# Altium footprint library 4.50-FPC插座-0.5mm间距.PcbLib: 41 footprints (part 3 of 3)
Each footprint in its own frame and in the unit in brackets; x right, y up, seen from the top. Pads: shape width x height; smd on the part's side, far side on the other; paste and mask are expansions set on the pad; w line width, h text height; cw(c..) or ccw(c..) is an arc to the next point about the centre after c.
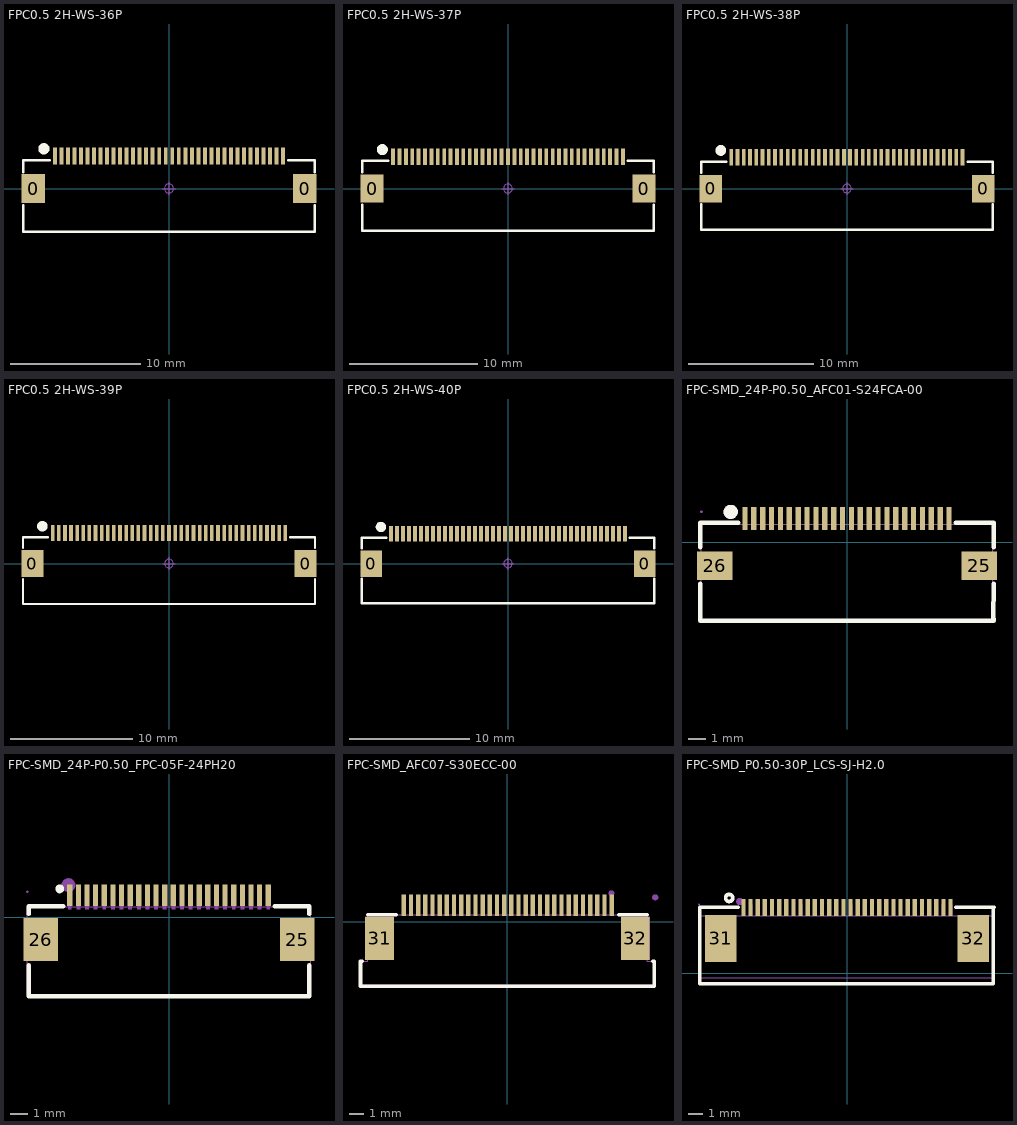
[diagram p2: the footprints below, top view; thin cyan lines are the x and y axes]

## FPC0.5 2H-WS-36P [mm] "长：22.2mm，宽：5.2mm，高：2mm 淘宝ID:黄晶宝石   店铺网址:https://shop463601444.taobao.com"
pads (38):
  rect 1.8x2.2 smd: 0(-10.4,0) 0(10.4,0)
  rect 0.3x1.3 smd: 1(-8.75,2.497) 2(-8.25,2.497) 3(-7.75,2.497) 4(-7.25,2.497) 5(-6.75,2.497) 6(-6.25,2.497) 7(-5.75,2.497) 8(-5.25,2.497) 9(-4.75,2.497) 10(-4.25,2.497) 11(-3.75,2.497) 12(-3.25,2.497) 13(-2.75,2.497) 14(-2.25,2.497) 15(-1.75,2.497) 16(-1.25,2.497) 17(-0.75,2.497) 18(-0.25,2.497) 19(0.25,2.497) 20(0.75,2.497) 21(1.25,2.497) 22(1.75,2.497) 23(2.25,2.497) 24(2.75,2.497) 25(3.25,2.497) 26(3.75,2.497) 27(4.25,2.497) 28(4.75,2.497) 29(5.25,2.497) 30(5.75,2.497) 31(6.25,2.497) 32(6.75,2.497) 33(7.25,2.497) 34(7.75,2.497) 35(8.25,2.497) 36(8.75,2.497)
Top Overlay:
  circle w0.5: c-9.594,3.048 r0.18
  lines w0.2: -11.175,-1.27 -11.175,-3.302 11.175,-3.302 11.175,-1.27 ; -11.175,1.27 -11.175,2.159 -9.143,2.159 ; 9.143,2.159 11.175,2.159 11.175,1.27
Mechanical 15:
  circle w0.05: c0,0 r0.35
  lines w0.05: -0.5,0 0.5,0 ; 0,-0.5 0,0.5
3D body "FPC0.5 2H-S-W-36P.STEP": height 2, standoff -0.01, extent -11.1,-3.15 11.1,2.85

## FPC0.5 2H-WS-37P [mm] "长：22.7mm，宽：5.2mm，高：2mm 淘宝ID:黄晶宝石   店铺网址:https://shop463601444.taobao.com"
pads (39):
  rect 1.8x2.2 smd: 0(-10.65,0) 0(10.65,0)
  rect 0.3x1.3 smd: 1(-9,2.497) 2(-8.5,2.497) 3(-8,2.497) 4(-7.5,2.497) 5(-7,2.497) 6(-6.5,2.497) 7(-6,2.497) 8(-5.5,2.497) 9(-5,2.497) 10(-4.5,2.497) 11(-4,2.497) 12(-3.5,2.497) 13(-3,2.497) 14(-2.5,2.497) 15(-2,2.497) 16(-1.5,2.497) 17(-1,2.497) 18(-0.5,2.497) 19(0,2.497) 20(0.5,2.497) 21(1,2.497) 22(1.5,2.497) 23(2,2.497) 24(2.5,2.497) 25(3,2.497) 26(3.5,2.497) 27(4,2.497) 28(4.5,2.497) 29(5,2.497) 30(5.5,2.497) 31(6,2.497) 32(6.5,2.497) 33(7,2.497) 34(7.5,2.497) 35(8,2.497) 36(8.5,2.497) 37(9,2.497)
Top Overlay:
  circle w0.5: c-9.844,3.048 r0.18
  lines w0.2: -11.425,-1.27 -11.425,-3.302 11.425,-3.302 11.425,-1.27 ; -11.425,1.27 -11.425,2.159 -9.393,2.159 ; 9.393,2.159 11.425,2.159 11.425,1.27
Mechanical 15:
  circle w0.05: c0,0 r0.35
  lines w0.05: -0.5,0 0.5,0 ; 0,-0.5 0,0.5
3D body "FPC0.5 2H-S-W-37P.STEP": height 2, standoff -0.01, extent -11.35,-3.15 11.35,2.85

## FPC0.5 2H-WS-38P [mm] "长：23.2mm，宽：5.2mm，高：2mm 淘宝ID:黄晶宝石   店铺网址:https://shop463601444.taobao.com"
pads (40):
  rect 1.8x2.2 smd: 0(-10.9,0) 0(10.9,0)
  rect 0.3x1.3 smd: 1(-9.25,2.497) 2(-8.75,2.497) 3(-8.25,2.497) 4(-7.75,2.497) 5(-7.25,2.497) 6(-6.75,2.497) 7(-6.25,2.497) 8(-5.75,2.497) 9(-5.25,2.497) 10(-4.75,2.497) 11(-4.25,2.497) 12(-3.75,2.497) 13(-3.25,2.497) 14(-2.75,2.497) 15(-2.25,2.497) 16(-1.75,2.497) 17(-1.25,2.497) 18(-0.75,2.497) 19(-0.25,2.497) 20(0.25,2.497) 21(0.75,2.497) 22(1.25,2.497) 23(1.75,2.497) 24(2.25,2.497) 25(2.75,2.497) 26(3.25,2.497) 27(3.75,2.497) 28(4.25,2.497) 29(4.75,2.497) 30(5.25,2.497) 31(5.75,2.497) 32(6.25,2.497) 33(6.75,2.497) 34(7.25,2.497) 35(7.75,2.497) 36(8.25,2.497) 37(8.75,2.497) 38(9.25,2.497)
Top Overlay:
  circle w0.5: c-10.094,3.048 r0.18
  lines w0.2: -11.675,-1.27 -11.675,-3.302 11.675,-3.302 11.675,-1.27 ; -11.675,1.27 -11.675,2.159 -9.643,2.159 ; 9.643,2.159 11.675,2.159 11.675,1.27
Mechanical 15:
  circle w0.05: c0,0 r0.35
  lines w0.05: -0.5,0 0.5,0 ; 0,-0.5 0,0.5
3D body "FPC0.5 2H-S-W-38P.STEP": height 2, standoff -0.01, extent -11.6,-3.15 11.6,2.85

## FPC0.5 2H-WS-39P [mm] "长：23.7mm，宽：5.2mm，高：2mm 淘宝ID:黄晶宝石   店铺网址:https://shop463601444.taobao.com"
pads (41):
  rect 1.8x2.2 smd: 0(-11.15,0) 0(11.15,0)
  rect 0.3x1.3 smd: 1(-9.5,2.497) 2(-9,2.497) 3(-8.5,2.497) 4(-8,2.497) 5(-7.5,2.497) 6(-7,2.497) 7(-6.5,2.497) 8(-6,2.497) 9(-5.5,2.497) 10(-5,2.497) 11(-4.5,2.497) 12(-4,2.497) 13(-3.5,2.497) 14(-3,2.497) 15(-2.5,2.497) 16(-2,2.497) 17(-1.5,2.497) 18(-1,2.497) 19(-0.5,2.497) 20(0,2.497) 21(0.5,2.497) 22(1,2.497) 23(1.5,2.497) 24(2,2.497) 25(2.5,2.497) 26(3,2.497) 27(3.5,2.497) 28(4,2.497) 29(4.5,2.497) 30(5,2.497) 31(5.5,2.497) 32(6,2.497) 33(6.5,2.497) 34(7,2.497) 35(7.5,2.497) 36(8,2.497) 37(8.5,2.497) 38(9,2.497) 39(9.5,2.497)
Top Overlay:
  circle w0.5: c-10.344,3.048 r0.18
  lines w0.2: -11.925,-1.27 -11.925,-3.302 11.925,-3.302 11.925,-1.27 ; -11.925,1.27 -11.925,2.159 -9.893,2.159 ; 9.893,2.159 11.925,2.159 11.925,1.27
Mechanical 15:
  circle w0.05: c0,0 r0.35
  lines w0.05: -0.5,0 0.5,0 ; 0,-0.5 0,0.5
3D body "FPC0.5 2H-S-W-39P.STEP": height 2, standoff -0.01, extent -11.85,-3.15 11.85,2.85

## FPC0.5 2H-WS-40P [mm] "长：24.2mm，宽：5.2mm，高：2mm 淘宝ID:黄晶宝石   店铺网址:https://shop463601444.taobao.com"
pads (42):
  rect 1.8x2.2 smd: 0(-11.4,0) 0(11.4,0)
  rect 0.3x1.3 smd: 1(-9.75,2.497) 2(-9.25,2.497) 3(-8.75,2.497) 4(-8.25,2.497) 5(-7.75,2.497) 6(-7.25,2.497) 7(-6.75,2.497) 8(-6.25,2.497) 9(-5.75,2.497) 10(-5.25,2.497) 11(-4.75,2.497) 12(-4.25,2.497) 13(-3.75,2.497) 14(-3.25,2.497) 15(-2.75,2.497) 16(-2.25,2.497) 17(-1.75,2.497) 18(-1.25,2.497) 19(-0.75,2.497) 20(-0.25,2.497) 21(0.25,2.497) 22(0.75,2.497) 23(1.25,2.497) 24(1.75,2.497) 25(2.25,2.497) 26(2.75,2.497) 27(3.25,2.497) 28(3.75,2.497) 29(4.25,2.497) 30(4.75,2.497) 31(5.25,2.497) 32(5.75,2.497) 33(6.25,2.497) 34(6.75,2.497) 35(7.25,2.497) 36(7.75,2.497) 37(8.25,2.497) 38(8.75,2.497) 39(9.25,2.497) 40(9.75,2.497)
Top Overlay:
  circle w0.5: c-10.594,3.048 r0.18
  lines w0.2: -12.175,-1.27 -12.175,-3.302 12.175,-3.302 12.175,-1.27 ; -12.175,1.27 -12.175,2.159 -10.143,2.159 ; 10.143,2.159 12.175,2.159 12.175,1.27
Mechanical 15:
  circle w0.05: c0,0 r0.35
  lines w0.05: -0.5,0 0.5,0 ; 0,-0.5 0,0.5
3D body "FPC0.5 2H-S-W-40P.STEP": height 2, standoff -0.01, extent -12.1,-3.15 12.1,2.85

## FPC-SMD_24P-P0.50_AFC01-S24FCA-00 [mm]
pads (26):
  rect 0.3x1.3 smd paste+0 mask+0.05: 1(-5.75,1.325) 2(-5.25,1.325) 3(-4.75,1.325) 4(-4.25,1.325) 5(-3.75,1.325) 6(-3.25,1.325) 7(-2.75,1.325) 8(-2.25,1.325) 9(-1.75,1.325) 10(-1.25,1.325) 11(-0.75,1.325) 12(-0.25,1.325) 13(0.25,1.325) 14(0.75,1.325) 15(1.25,1.325) 16(1.75,1.325) 17(2.25,1.325) 18(2.75,1.325) 19(3.25,1.325) 20(3.75,1.325) 21(4.25,1.325) 22(4.75,1.325) 23(5.25,1.325) 24(5.75,1.325)
  rect 2x1.6 smd: 25(7.45,-1.325) 26(-7.45,-1.325)
Top Overlay:
  circle w0.4: c-6.55,1.7 r0.2
  lines w0.254: -8.264,-2.355 -8.264,-4.445 8.256,-4.445 8.256,-4.318 ; -8.263,-0.294 -8.263,1.088 -6.131,1.088 ; 6.131,1.088 8.263,1.088 8.263,-0.294 ; 8.25,-4.35 8.263,-2.356
Mechanical 6:
  circle w0.4: c-6.55,1.7 r0.2
Mechanical 15:
  region: 5.85,0.955 5.65,0.955 5.65,1.705 5.85,1.705
  region: 5.35,0.955 5.15,0.955 5.15,1.705 5.35,1.705
  region: 4.85,0.955 4.65,0.955 4.65,1.705 4.85,1.705
  region: 4.35,0.955 4.15,0.955 4.15,1.705 4.35,1.705
  region: 3.85,0.955 3.65,0.955 3.65,1.705 3.85,1.705
  region: 3.35,0.955 3.15,0.955 3.15,1.705 3.35,1.705
  region: 2.85,0.955 2.65,0.955 2.65,1.705 2.85,1.705
  region: 2.35,0.955 2.15,0.955 2.15,1.705 2.35,1.705
  region: 1.85,0.955 1.65,0.955 1.65,1.705 1.85,1.705
  region: 1.35,0.955 1.15,0.955 1.15,1.705 1.35,1.705
  region: 0.85,0.955 0.65,0.955 0.65,1.705 0.85,1.705
  region: 0.35,0.955 0.15,0.955 0.15,1.705 0.35,1.705
  region: -0.15,0.955 -0.35,0.955 -0.35,1.705 -0.15,1.705
  region: -0.65,0.955 -0.85,0.955 -0.85,1.705 -0.65,1.705
  region: -1.15,0.955 -1.35,0.955 -1.35,1.705 -1.15,1.705
  region: -1.65,0.955 -1.85,0.955 -1.85,1.705 -1.65,1.705
  region: -2.15,0.955 -2.35,0.955 -2.35,1.705 -2.15,1.705
  region: -2.65,0.955 -2.85,0.955 -2.85,1.705 -2.65,1.705
  region: -3.15,0.955 -3.35,0.955 -3.35,1.705 -3.15,1.705
  region: -3.65,0.955 -3.85,0.955 -3.85,1.705 -3.65,1.705
  region: -4.15,0.955 -4.35,0.955 -4.35,1.705 -4.15,1.705
  region: -4.65,0.955 -4.85,0.955 -4.85,1.705 -4.65,1.705
  region: -5.15,0.955 -5.35,0.955 -5.35,1.705 -5.15,1.705
  region: -5.65,0.955 -5.85,0.955 -5.85,1.705 -5.65,1.705
  region: -6.7,-0.825 -6.7,-1.825 -8.2,-1.825 -8.2,-0.825
  region: 8.2,-0.825 8.2,-1.825 6.7,-1.825 6.7,-0.825
  region: -8.14,1.705 -8.14,1.68 -8.175,1.645 -8.225,1.645 -8.26,1.68 -8.26,1.705 -8.26,1.73 -8.225,1.765 -8.175,1.765 -8.14,1.73 -8.14,1.705
  lines w0.051: -8.2,-4.395 8.2,-4.395 8.2,1.005 -8.2,1.005 -8.2,-4.395
3D body "FPC0.5 2H-S-W-24P.STEP": height 2, standoff -0.01, extent -8.1,-4.65 8.1,1.35

## FPC-SMD_24P-P0.50_FPC-05F-24PH20 [mm]
pads (26):
  rect 0.3x1.25 smd paste+0 mask+0.05: 1(-5.75,1.288) 2(-5.25,1.288) 3(-4.75,1.288) 4(-4.25,1.288) 5(-3.75,1.288) 6(-3.25,1.288) 7(-2.75,1.288) 8(-2.25,1.288) 9(-1.75,1.288) 10(-1.25,1.288) 11(-0.75,1.288) 12(-0.25,1.288) 13(0.25,1.288) 14(0.75,1.288) 15(1.25,1.288) 16(1.75,1.288) 17(2.25,1.288) 18(2.75,1.288) 19(3.25,1.288) 20(3.75,1.288) 21(4.25,1.288) 22(4.75,1.288) 23(5.25,1.288) 24(5.75,1.288)
  rect 2x2.5 smd paste+0 mask+0.05: 25(7.44,-1.288) 26(-7.44,-1.288)
Top Overlay:
  circle w0.254: c-6.327,1.651 r0.127
  lines w0.254: -8.128,-2.769 -8.128,-4.572 8.128,-4.572 8.128,-2.769 ; -8.128,0.194 -8.128,0.635 -6.13,0.635 ; 6.129,0.635 8.128,0.635 8.128,0.194
Mechanical 6:
  circle w0.4: c-5.824,1.869 r0.2
Mechanical 15:
  region: 5.65,1.478 5.85,1.478 5.85,0.478 5.65,0.478
  region: 5.15,1.478 5.35,1.478 5.35,0.478 5.15,0.478
  region: 4.65,1.478 4.85,1.478 4.85,0.478 4.65,0.478
  region: 4.15,1.478 4.35,1.478 4.35,0.478 4.15,0.478
  region: 3.65,1.478 3.85,1.478 3.85,0.478 3.65,0.478
  region: 3.15,1.478 3.35,1.478 3.35,0.478 3.15,0.478
  region: 2.65,1.478 2.85,1.478 2.85,0.478 2.65,0.478
  region: 2.15,1.478 2.35,1.478 2.35,0.478 2.15,0.478
  region: 1.65,1.478 1.85,1.478 1.85,0.478 1.65,0.478
  region: 1.15,1.478 1.35,1.478 1.35,0.478 1.15,0.478
  region: 0.65,1.478 0.85,1.478 0.85,0.478 0.65,0.478
  region: 0.15,1.478 0.35,1.478 0.35,0.478 0.15,0.478
  region: -0.35,1.478 -0.15,1.478 -0.15,0.478 -0.35,0.478
  region: -0.85,1.478 -0.65,1.478 -0.65,0.478 -0.85,0.478
  region: -1.35,1.478 -1.15,1.478 -1.15,0.478 -1.35,0.478
  region: -1.85,1.478 -1.65,1.478 -1.65,0.478 -1.85,0.478
  region: -2.35,1.478 -2.15,1.478 -2.15,0.478 -2.35,0.478
  region: -2.85,1.478 -2.65,1.478 -2.65,0.478 -2.85,0.478
  region: -3.35,1.478 -3.15,1.478 -3.15,0.478 -3.35,0.478
  region: -3.85,1.478 -3.65,1.478 -3.65,0.478 -3.85,0.478
  region: -4.35,1.478 -4.15,1.478 -4.15,0.478 -4.35,0.478
  region: -4.85,1.478 -4.65,1.478 -4.65,0.478 -4.85,0.478
  region: -5.35,1.478 -5.15,1.478 -5.15,0.478 -5.35,0.478
  region: -5.85,1.478 -5.65,1.478 -5.65,0.478 -5.85,0.478
  region: -8.14,-1.838 -8.14,-0.738 -6.74,-0.738 -6.74,-1.838
  region: 6.74,-1.838 6.74,-0.738 8.14,-0.738 8.14,-1.838
  region: -8.14,1.478 -8.14,1.453 -8.175,1.418 -8.225,1.418 -8.26,1.453 -8.26,1.478 -8.26,1.502 -8.225,1.538 -8.175,1.538 -8.14,1.502 -8.14,1.478
  lines w0.051: -8.2,-4.516 -8.2,0.604 8.2,0.604 8.2,-4.516 -8.2,-4.516
3D body "FPC0.5 2H-S-W-24P.STEP": height 2, standoff -0.01, extent -8.1,-4.65 8.1,1.35

## FPC-SMD_AFC07-S30ECC-00 [mm]
pads (32):
  rect 0.3x1.5 smd: 1(7.27,1.153) 2(6.77,1.153) 3(6.27,1.153) 4(5.77,1.153) 5(5.27,1.153) 6(4.77,1.153) 7(4.27,1.153) 8(3.77,1.153) 9(3.27,1.153) 10(2.77,1.153) 11(2.27,1.153) 12(1.77,1.153) 13(1.27,1.153) 14(0.77,1.153) 15(0.274,1.155) 16(-0.229,1.154) 17(-0.729,1.153) 18(-1.229,1.153) 19(-1.729,1.153) 20(-2.231,1.156) 21(-2.731,1.156) 22(-3.231,1.156) 23(-3.731,1.156) 24(-4.232,1.156) 25(-4.731,1.156) 26(-5.232,1.157) 27(-5.732,1.157) 28(-6.232,1.156) 29(-6.731,1.157) 30(-7.232,1.157)
  rect 2x3 smd: 31(-8.925,-1.157) 32(8.925,-1.157)
Top Overlay:
  lines w0.254: -10.136,-2.75 -10.25,-2.75 -10.25,-4.5 10.25,-4.5 10.25,-2.75 10.136,-2.75 ; -9.75,0.5 -7.75,0.5 ; 7.75,0.5 9.75,0.5
Mechanical 6:
  circle w0.2: c7.25,2 r0.1
Mechanical 15:
  drawing of 71 lines, arcs and shapes, not listed
3D body "FPC1~FPC-SMD_P0.50-30P_LCS-SJ-H2.0~FPC-SMD_P0.50-30P_LCS-SJ-H2.0~JeJ3.STEP": height 2.01, standoff 0, extent -10.3,-4.5 10.3,0.7

## FPC-SMD_P0.50-30P_LCS-SJ-H2.0 [mm]
pads (32):
  rect 0.3x1.2 smd: 1(-7.25,4.598) 2(-6.75,4.598) 3(-6.25,4.598) 4(-5.75,4.598) 5(-5.25,4.598) 6(-4.75,4.598) 7(-4.25,4.598) 8(-3.75,4.598) 9(-3.25,4.598) 10(-2.75,4.598) 11(-2.25,4.598) 12(-1.75,4.598) 13(-1.25,4.598) 14(-0.75,4.598) 15(-0.25,4.598) 16(0.25,4.598) 17(0.75,4.598) 18(1.248,4.6) 19(1.748,4.6) 20(2.248,4.6) 21(2.748,4.6) 22(3.248,4.6) 23(3.748,4.6) 24(4.248,4.6) 25(4.748,4.6) 26(5.248,4.6) 27(5.748,4.6) 28(6.248,4.6) 29(6.748,4.6) 30(7.248,4.6)
  rect 2.2x3.3 smd: 31(-8.852,2.43) 32(8.848,2.43)
Top Overlay:
  circle w0.254: c-8.252,5.265 r0.25
  lines w0.254: -7.631,4.6 -10.302,4.6 -10.302,-0.735 10.248,-0.735 10.248,4.6 ; 7.629,4.6 10.298,4.6
Mechanical 6:
  circle w0.254: c-7.502,5.015 r0.127
Mechanical 15:
  drawing of 37 lines, arcs and shapes, not listed
3D body "FPC1~FPC-SMD_P0.50-30P_LCS-SJ-H2.0~FPC-SMD_P0.50-30P_LCS-SJ-H2.0~JeJ3.STEP": height 2.01, standoff 0, extent -10.3,-0.7 10.3,4.5